# Altium footprint library MIC2544-1YMM-TR.PcbLib: 3 footprints
Each footprint in its own frame and in the unit in brackets; x right, y up, seen from the top. Pads: shape width x height; smd on the part's side, far side on the other; paste and mask are expansions set on the pad; w line width, h text height; cw(c..) or ccw(c..) is an arc to the next point about the centre after c.
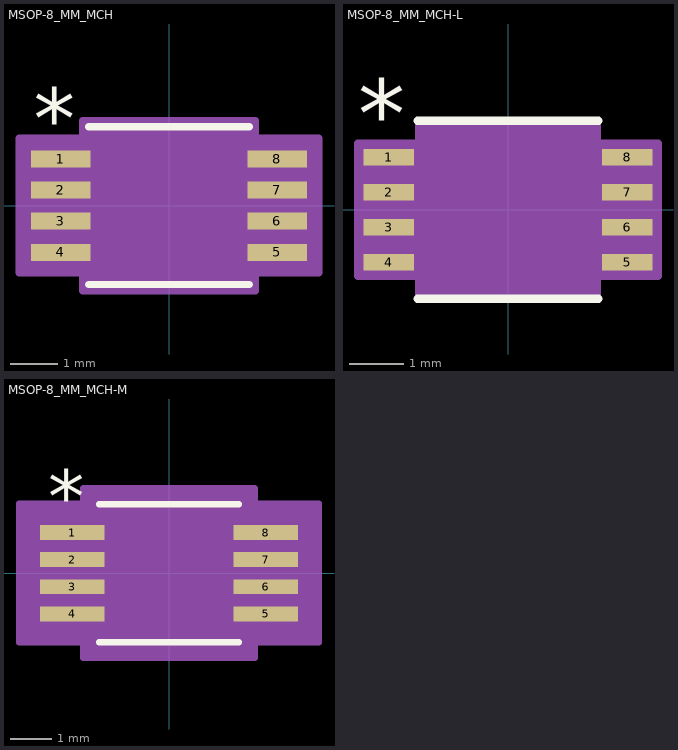
[diagram p0: the footprints below, top view; thin cyan lines are the x and y axes]

## MSOP-8_MM_MCH [mil]
pads (8):
  rect 49x14 smd paste+0 mask+0: 1(-89,38.39) 2(-89,12.8) 3(-89,-12.8) 4(-89,-38.39) 5(89,-38.39) 6(89,-12.8) 7(89,12.8) 8(89,38.39)
Top Overlay:
  lines w6: -66,-65 66,-65 ; -66,65 66,65
  text ".Designator" at -137.5,-25 h50
  text "*" at -111.5,47.39 h50
Mechanical 13:
  lines w1: -12,60 ccw(c0,60) 12,60 ; -99.5,-44.39 -99.5,-32.39 -61,-32.39 -61,-44.39 -99.5,-44.39 ; -99.5,-18.8 -99.5,-6.8 -61,-6.8 -61,-18.8 -99.5,-18.8 ; -99.5,6.8 -99.5,18.8 -61,18.8 -61,6.8 -99.5,6.8 ; -99.5,32.39 -99.5,44.39 -61,44.39 -61,32.39 -99.5,32.39 ; -61,-60 61,-60 61,60 -61,60 -61,-60 ; 61,-44.39 61,-32.39 99.5,-32.39 99.5,-44.39 61,-44.39 ; 61,-18.8 61,-6.8 99.5,-6.8 99.5,-18.8 61,-18.8 ; 61,6.8 61,18.8 99.5,18.8 99.5,6.8 61,6.8 ; 61,32.39 61,44.39 99.5,44.39 99.5,32.39 61,32.39
  text "*" at -58.5,7 h50
  text ".Designator" at -137.5,-25 h50
Mechanical 15:
  region: -71,-55.39 -123.5,-55.39 -123.5,55.39 -71,55.39 -71,70 71,70 71,55.39 123.5,55.39 123.5,-55.39 71,-55.39 71,-70 -71,-70
  lines w6: -123.5,-55.39 -123.5,55.39 -71,55.39 -71,70 71,70 71,55.39 123.5,55.39 123.5,-55.39 71,-55.39 71,-70 -71,-70 -71,-55.39 -123.5,-55.39
3D body "MSOP-8_MM_MCH.step": height 36.1, standoff 0, extent -99.49,-60 99.49,60

## MSOP-8_MM_MCH-L [mil]
pads (8):
  rect 37x12 smd paste+0 mask+0: 1(-87,38.39) 2(-87,12.8) 3(-87,-12.8) 4(-87,-38.39) 5(87,-38.39) 6(87,-12.8) 7(87,12.8) 8(87,38.39)
Top Overlay:
  lines w6: -66,-65 66,-65 ; -66,65 66,65
  text ".Designator" at -137.5,-25 h50
  text "*" at -109.5,45.39 h50
Mechanical 13:
  lines w1: -12,60 ccw(c0,60) 12,60 ; -99.5,-44.39 -99.5,-32.39 -61,-32.39 -61,-44.39 -99.5,-44.39 ; -99.5,-18.8 -99.5,-6.8 -61,-6.8 -61,-18.8 -99.5,-18.8 ; -99.5,6.8 -99.5,18.8 -61,18.8 -61,6.8 -99.5,6.8 ; -99.5,32.39 -99.5,44.39 -61,44.39 -61,32.39 -99.5,32.39 ; -61,-60 61,-60 61,60 -61,60 -61,-60 ; 61,-44.39 61,-32.39 99.5,-32.39 99.5,-44.39 61,-44.39 ; 61,-18.8 61,-6.8 99.5,-6.8 99.5,-18.8 61,-18.8 ; 61,6.8 61,18.8 99.5,18.8 99.5,6.8 61,6.8 ; 61,32.39 61,44.39 99.5,44.39 99.5,32.39 61,32.39
  text "*" at -58.5,7 h50
  text ".Designator" at -137.5,-25 h50
Mechanical 15:
  region: -65,-48.39 -109.5,-48.39 -109.5,48.39 -65,48.39 -65,64 65,64 65,48.39 109.5,48.39 109.5,-48.39 65,-48.39 65,-64 -65,-64
  lines w6: -109.5,-48.39 -109.5,48.39 -65,48.39 -65,64 65,64 65,48.39 109.5,48.39 109.5,-48.39 65,-48.39 65,-64 -65,-64 -65,-48.39 -109.5,-48.39
3D body "MSOP-8_MM_MCH.step": height 36.1, standoff 0, extent -99.49,-60 99.49,60

## MSOP-8_MM_MCH-M [mil]
pads (8):
  rect 60.5x14 smd paste+0 mask+0: 1(-91.25,38.39) 2(-91.25,12.8) 3(-91.25,-12.8) 4(-91.25,-38.39) 5(91.25,-38.39) 6(91.25,-12.8) 7(91.25,12.8) 8(91.25,38.39)
Top Overlay:
  lines w6: -66,-65 66,-65 ; -66,65 66,65
  text ".Designator" at -137.5,-25 h50
  text "*" at -113.75,47.39 h50
Mechanical 13:
  lines w1: -12,60 ccw(c0,60) 12,60 ; -99.5,-44.39 -99.5,-32.39 -61,-32.39 -61,-44.39 -99.5,-44.39 ; -99.5,-18.8 -99.5,-6.8 -61,-6.8 -61,-18.8 -99.5,-18.8 ; -99.5,6.8 -99.5,18.8 -61,18.8 -61,6.8 -99.5,6.8 ; -99.5,32.39 -99.5,44.39 -61,44.39 -61,32.39 -99.5,32.39 ; -61,-60 61,-60 61,60 -61,60 -61,-60 ; 61,-44.39 61,-32.39 99.5,-32.39 99.5,-44.39 61,-44.39 ; 61,-18.8 61,-6.8 99.5,-6.8 99.5,-18.8 61,-18.8 ; 61,6.8 61,18.8 99.5,18.8 99.5,6.8 61,6.8 ; 61,32.39 61,44.39 99.5,44.39 99.5,32.39 61,32.39
  text "*" at -58.5,7 h50
  text ".Designator" at -137.5,-25 h50
Mechanical 15:
  region: -81,-65.39 -141.5,-65.39 -141.5,65.39 -81,65.39 -81,80 81,80 81,65.39 141.5,65.39 141.5,-65.39 81,-65.39 81,-80 -81,-80
  lines w6: -141.5,-65.39 -141.5,65.39 -81,65.39 -81,80 81,80 81,65.39 141.5,65.39 141.5,-65.39 81,-65.39 81,-80 -81,-80 -81,-65.39 -141.5,-65.39
3D body "MSOP-8_MM_MCH.step": height 36.1, standoff 0, extent -99.49,-60 99.49,60